# Altium footprint library test_point.PcbLib: 1 footprints
Each footprint in its own frame and in the unit in brackets; x right, y up, seen from the top. Pads: shape width x height; smd on the part's side, far side on the other; paste and mask are expansions set on the pad; w line width, h text height; cw(c..) or ccw(c..) is an arc to the next point about the centre after c.
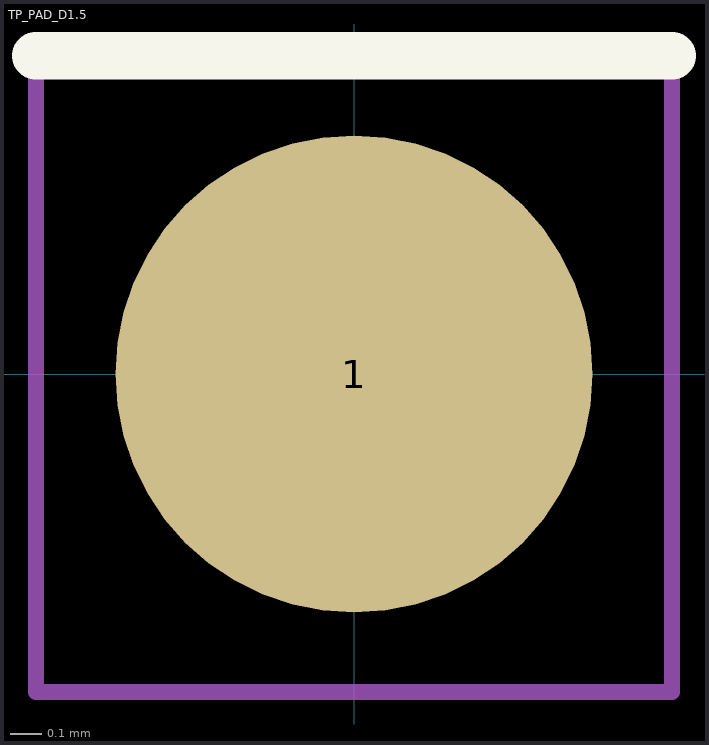
[diagram p0: the footprint, top view; thin cyan lines are the x and y axes]

## TP_PAD_D1.5 [mm] "SMD test pad 1.5 mm, no paste, no component body"
pads (1):
  round 1.5 smd paste-0.75: 1(0,0)
Top Overlay:
  lines w0.15: -1,1 1,1
  text ".Designator" at 0,1.35 h1
Top Courtyard:
  lines w0.05: -1,-1 -1,1 1,1 1,-1 -1,-1